# Altium schematic symbol library TPS2115AIPWRQ1.SchLib: 1 symbol
Pins are listed as number, name and electrical type; pins without a type are passive.

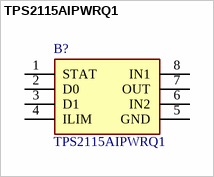
[diagram p0: symbol TPS2115AIPWRQ1]

## TPS2115AIPWRQ1
designator B?
Automotive Autoswitching Power Mux; Manufacturer_Name: Texas Instruments; Geometry.Height: 1.2mm; Mouser Part Number: 595-TPS2115AIPWRQ1; Mouser Price/Stock: https://www.mouser.co.uk/ProductDetail/Texas-Instruments/TPS2115AIPWRQ1?qs=IDSsxkoac0yJ8twoaysKxw%3D%3D; Manufacturer_Part_Number: TPS2115AIPWRQ1; Datasheet Link: http://componentsearchengine.com/Datasheets/1/TPS2115AIPWRQ1.pdf
footprint SOP65P640X120-8N
pins: 1 STAT, 2 D0, 3 D1, 4 ILIM, 5 GND, 6 IN2, 7 OUT, 8 IN1